# Altium footprint library PBL - SMD Packages.PcbLib: 144 footprints (part 2 of 9)
Each footprint in its own frame and in the unit in brackets; x right, y up, seen from the top. Pads: shape width x height; smd on the part's side, far side on the other; paste and mask are expansions set on the pad; w line width, h text height; cw(c..) or ccw(c..) is an arc to the next point about the centre after c.
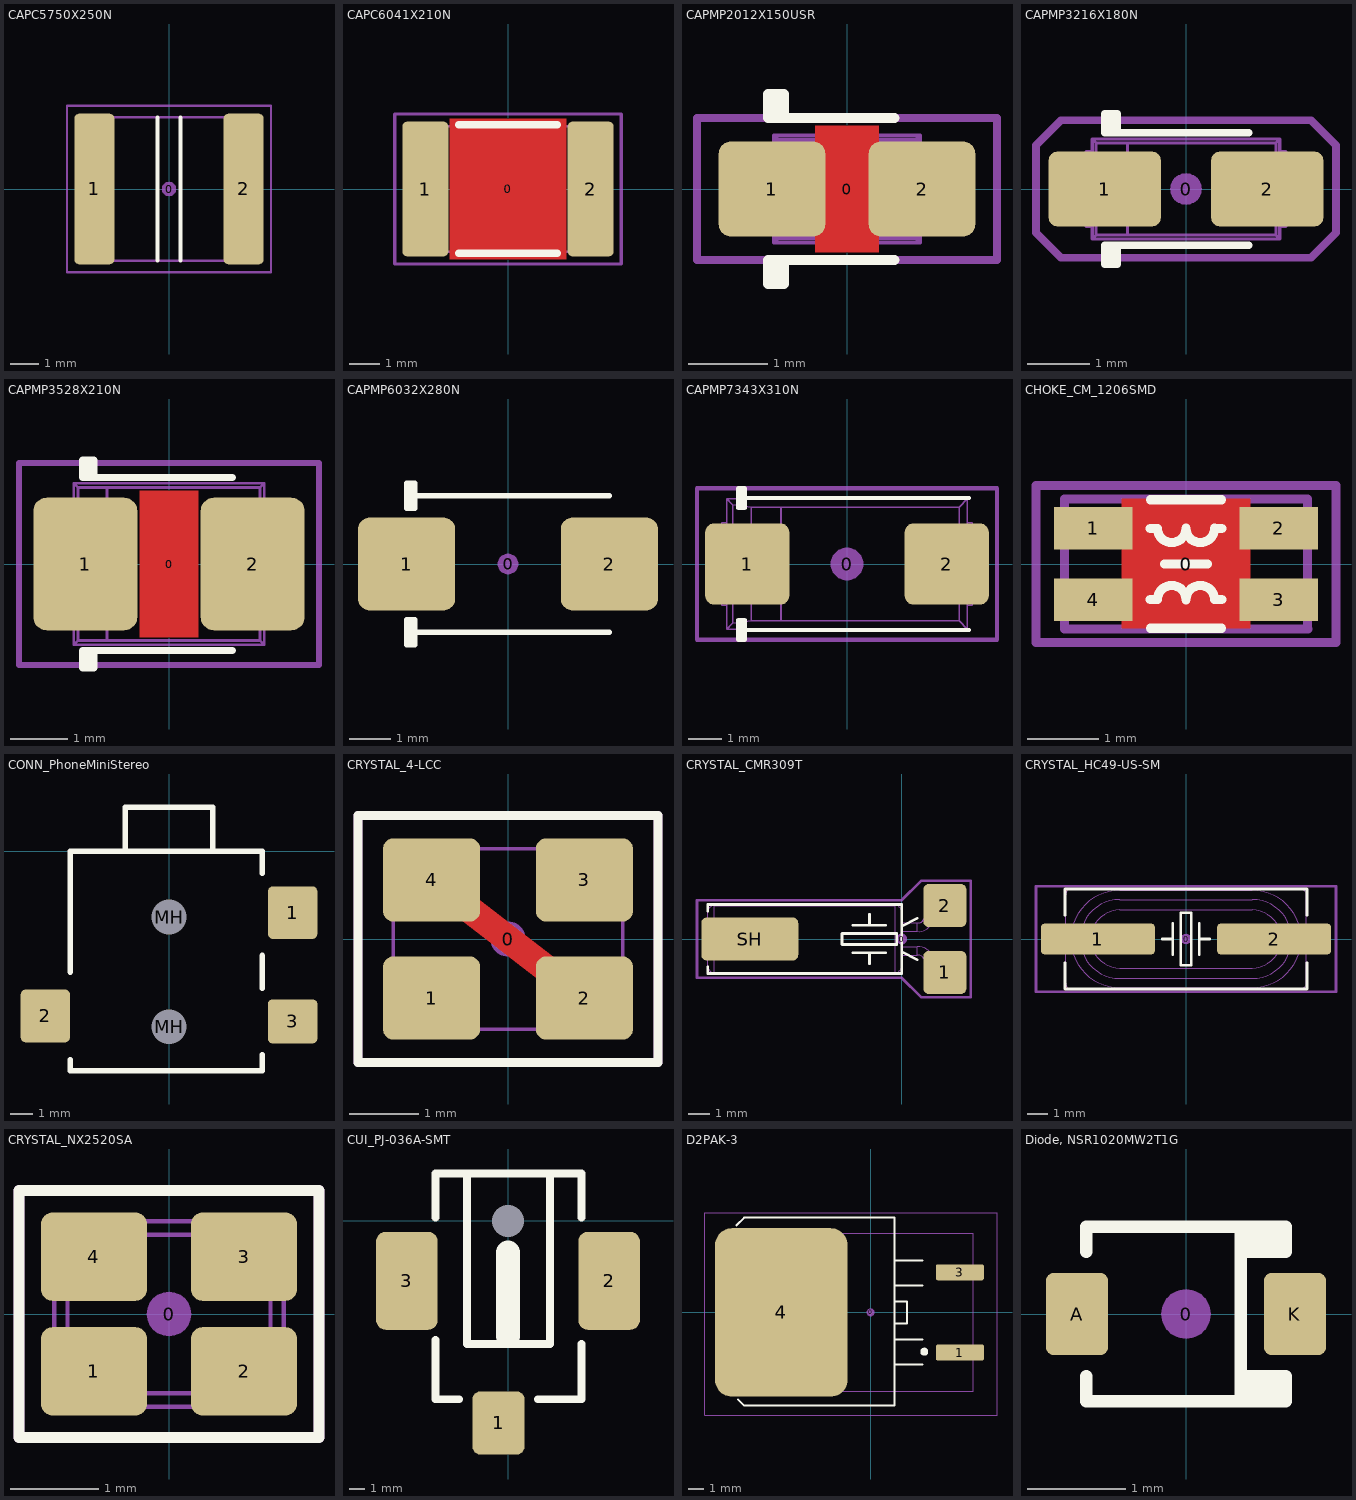
[diagram p1: the footprints below, top view; thin cyan lines are the x and y axes]

## CAPC5750X250N [mm] "Chip Capacitor, Body 5.7x5.0mm, 2220, IPC Medium Density"
height 2.5
pads (3):
  round 0.508 on Mech15: 0(0,0)
  rrect25% 1.4x5.25 smd: 1(-2.6,0) 2(2.6,0)
Top Overlay:
  lines w0.127: -0.4,-2.5 -0.4,2.5 ; 0.4,-2.5 0.4,2.5
13 - 3D Top Side:
  lines w0.076: -2.85,-2.5 2.85,-2.5 2.85,2.5 -2.85,2.5 -2.85,-2.5
15 - Top Courtyards:
  lines w0.076: -3.55,-2.9 -3.55,2.9 3.55,2.9 3.55,-2.9 -3.55,-2.9
3D body: height 2.49, standoff -0.01, extent -3.05,-2.7 3.05,2.7

## CAPC6041X210N [mm] "Stacked film capacitor, Body 6.0x4.1mm, 2416, IPC Nominal settings"
height 2.1
pads (3):
  round 0.508 on Mech15: 0(0,0)
  rrect20% 1.5x4.4 smd: 1(-2.7,0) 2(2.7,0)
Top Layer:
  pour cut-out: -1.9,2.3 1.9,2.3 1.9,-2.3 -1.9,-2.3
Top Overlay:
  lines w0.254: -1.6,-2.1 1.6,-2.1 ; -1.6,2.1 1.6,2.1
13 - 3D Top Side:
  lines w0.076: -3,-2.05 3,-2.05 3,2.05 -3,2.05 -3,-2.05
15 - Top Courtyards:
  lines w0.1: -3.7,-2.45 3.7,-2.45 3.7,2.45 -3.7,2.45 -3.7,-2.45
3D body: height 2.09, standoff -0.01, extent -3,-2.05 3,2.05
3D body: height 1.25, standoff 0, extent -1.499,-0.799 1.499,0.799

## CAPMP2012X150USR [mm] "Molded body capacitor, Body 2.0x1.2mm, 0805, IPC Medium Density"
height 1.5
pads (3):
  round 0.254 on Mech15: 0(0,0)
  rrect25% 1.35x1.2 smd: 1(-0.95,0) 2(0.95,0)
Top Layer:
  pour cut-out: -0.4,0.8 0.4,0.8 0.4,-0.8 -0.4,-0.8
Top Overlay:
  lines w0.127: -0.9,-1.2 -0.9,-0.9 ; -0.9,0.9 -0.9,1.2 ; -0.8,-0.9 -0.8,-1.2 -1,-1.2 -1,-0.9 0.6,-0.9 ; -0.8,0.9 -0.8,1.2 -1,1.2 -1,0.9 0.6,0.9
13 - 3D Top Side:
  lines w0.05: -1.025,-0.25 -0.925,-0.25 ; -1.025,0.25 -0.925,0.25 ; -0.925,-0.5 -1.025,-0.5 -1.025,0.5 -0.925,0.5 ; -0.373,-0.623 -0.373,0.623 ; 0.925,-0.5 1.025,-0.5 1.025,0.5 0.925,0.5 ; 0.925,-0.25 1.025,-0.25 ; 0.925,0.25 1.025,0.25 ; -0.925,-0.675 -0.873,-0.623 ; -0.925,-0.675 -0.925,0.675 ; -0.925,-0.675 0.925,-0.675 ; -0.925,0.675 -0.873,0.623 ; -0.925,0.675 0.925,0.675 ; -0.873,-0.623 -0.873,0.623 ; -0.873,-0.623 0.873,-0.623 ; -0.873,0.623 0.873,0.623 ; 0.873,-0.623 0.873,0.623 ; 0.873,-0.623 0.925,-0.675 ; 0.873,0.623 0.925,0.675 ; 0.925,-0.675 0.925,0.675
15 - Top Courtyards:
  lines w0.1: -1.9,-0.9 -1.9,0.9 1.9,0.9 1.9,-0.9 -1.9,-0.9
3D body: height 1.5, standoff 0, extent -1.025,-0.675 1.025,0.675

## CAPMP3216X180N [mm] "Capacitor, polarized, Molded Body, EIA 535BAAC size A; 3.20mm L X 1.60mm W X 1.80mm H"
height 1.8
pads (3):
  round 0.508 on Mech15: 0(0,0)
  rrect25% 1.8x1.2 smd: 1(-1.3,0) 2(1.3,0)
Top Overlay:
  lines w0.127: -1.2,-1.2 -1.2,-0.9 ; -1.2,0.9 -1.2,1.2 ; -1.1,-0.9 -1.1,-1.2 -1.3,-1.2 -1.3,-0.9 1,-0.9 ; -1.1,0.9 -1.1,1.2 -1.3,1.2 -1.3,0.9 1,0.9
13 - 3D Top Side:
  lines w0.05: -1.6,-0.36 -1.499,-0.36 ; -1.6,0.36 -1.499,0.36 ; -1.499,-0.6 -1.6,-0.6 -1.6,0.6 -1.499,0.6 ; -0.937,-0.737 -0.937,0.737 ; 1.499,-0.6 1.6,-0.6 1.6,0.6 1.499,0.6 ; 1.499,-0.36 1.6,-0.36 ; 1.499,0.36 1.6,0.36 ; -1.5,-0.8 -1.5,0.8 ; -1.5,-0.8 1.5,-0.8 ; -1.5,-0.8 -1.437,-0.737 ; -1.5,0.8 1.5,0.8 ; -1.5,0.8 -1.437,0.737 ; -1.437,-0.737 -1.437,0.737 ; -1.437,-0.737 1.437,-0.737 ; -1.437,0.737 1.437,0.737 ; 1.437,-0.737 1.437,0.737 ; 1.437,-0.737 1.5,-0.8 ; 1.437,0.737 1.5,0.8 ; 1.5,-0.8 1.5,0.8
15 - Top Courtyards:
  lines w0.127: -2.4,-0.7 -2,-1.1 2,-1.1 2.4,-0.7 2.4,0.7 2,1.1 -2,1.1 -2.4,0.7 -2.4,-0.7
3D body: height 1.8, standoff 0, extent -1.6,-0.8 1.6,0.8

## CAPMP3528X210N [mm] "Molded body capacitor, Body 3.5x2.8mm, 1210, IPC Nominal settings"
height 2.1
pads (3):
  round 0.254 on Mech15: 0(0,0)
  rrect25% 1.8x2.3 smd: 1(-1.45,0) 2(1.45,0)
Top Layer:
  pour cut-out: -0.508,1.27 0.508,1.27 0.508,-1.27 -0.508,-1.27
Top Overlay:
  lines w0.127: -1.4,-1.8 -1.4,-1.5 ; -1.4,1.5 -1.4,1.8 ; -1.3,-1.5 -1.3,-1.8 -1.5,-1.8 -1.5,-1.5 1.1,-1.5 ; -1.3,1.5 -1.3,1.8 -1.5,1.8 -1.5,1.5 1.1,1.5
13 - 3D Top Side:
  lines w0.05: -1.75,-0.55 -1.65,-0.55 ; -1.75,0.55 -1.65,0.55 ; -1.65,-1.1 -1.75,-1.1 -1.75,1.1 -1.65,1.1 ; -1.077,-1.327 -1.077,1.327 ; 1.65,-1.1 1.75,-1.1 1.75,1.1 1.65,1.1 ; 1.65,-0.55 1.75,-0.55 ; 1.65,0.55 1.75,0.55 ; -1.65,-1.4 1.65,-1.4 ; -1.65,-1.4 -1.65,1.4 ; -1.65,-1.4 -1.577,-1.327 ; -1.65,1.4 1.65,1.4 ; -1.65,1.4 -1.577,1.327 ; -1.577,-1.327 1.577,-1.327 ; -1.577,-1.327 -1.577,1.327 ; -1.577,1.327 1.577,1.327 ; 1.577,-1.327 1.65,-1.4 ; 1.577,-1.327 1.577,1.327 ; 1.577,1.327 1.65,1.4 ; 1.65,-1.4 1.65,1.4
15 - Top Courtyards:
  lines w0.1: -2.6,-1.75 2.6,-1.75 2.6,1.75 -2.6,1.75 -2.6,-1.75
3D body: height 2.1, standoff 0, extent -1.75,-1.4 1.75,1.4

## CAPMP6032X280N [mm] "Capacitor, polarized, Molded Body, EIA 535BAAC size C; 6.00mm L X 3.20mm W X 2.80mm H"
height 2.8
pads (3):
  round 0.508 on Mech15: 0(0,0)
  rrect25% 2.35x2.25 smd: 1(-2.45,0) 2(2.45,0)
Top Overlay:
  lines w0.127: -2.45,-1.65 2.45,-1.65 ; -2.45,1.65 2.45,1.65 ; -2.35,-1.95 -2.35,-1.65 -2.35,-1.35 ; -2.35,1.35 -2.35,1.65 -2.35,1.95 ; -2.45,-1.95 -2.25,-1.95 -2.25,-1.65 -2.25,-1.35 -2.45,-1.35 -2.45,-1.95 ; -2.45,1.35 -2.25,1.35 -2.25,1.65 -2.25,1.95 -2.45,1.95 -2.45,1.35
3D body: height 2.8, standoff 0, extent -3,-1.6 3,1.6

## CAPMP7343X310N [mm] "Molded body capacitor, Body 7.3x4.3mm, 2917, IPC Nominal settings"
height 3.1
pads (3):
  round 1 on Mech15: 0(0,0)
  rrect20% 2.55x2.45 smd: 1(-3.025,0) 2(3.025,0)
Top Overlay:
  lines w0.127: -3.3,-2 3.7,-2 ; -3.3,2 3.7,2 ; -3.2,-2.3 -3.2,-2 -3.2,-1.7 ; -3.2,1.7 -3.2,2 -3.2,2.3 ; -3.3,-2.3 -3.3,-1.7 -3.1,-1.7 -3.1,-2 -3.1,-2.3 -3.3,-2.3 ; -3.3,1.7 -3.3,2.3 -3.1,2.3 -3.1,2 -3.1,1.7 -3.3,1.7
13 - 3D Top Side:
  lines w0.05: -3.8,-0.5 -3.65,-0.5 ; -3.8,0.5 -3.65,0.5 ; -3.67,-0.5 -3.67,0.5 ; -3.65,-1.25 -3.8,-1.25 -3.8,1.25 -3.65,1.25 ; -2.901,-0.575 -2.901,0.575 ; 3.65,-1.25 3.8,-1.25 3.8,1.25 3.65,1.25 ; 3.65,-0.5 3.8,-0.5 ; 3.65,0.5 3.8,0.5 ; 3.67,-0.5 3.67,0.5 ; -3.65,-1.975 -3.65,1.975 ; -3.65,-1.975 -3.471,-1.796 ; -3.65,-1.975 3.65,-1.975 ; -3.65,1.975 3.65,1.975 ; -3.65,1.975 -3.471,1.796 ; -3.471,-1.796 -3.471,1.796 ; -3.471,-1.796 -2.907,-1.727 ; -3.471,1.796 -2.907,1.727 ; -2.907,-1.727 -2.907,-0.575 -2.001,-0.575 -2.001,-1.727 ; -2.907,-1.727 -2.001,-1.727 ; -2.907,1.727 -2.907,0.575 -2.001,0.575 -2.001,1.727 ; -2.907,1.727 -2.001,1.727 ; -2.001,-1.727 3.401,-1.726 ; -2.001,1.727 3.401,1.726 ; 3.401,-1.726 3.401,1.726 ; 3.401,-1.726 3.65,-1.975 ; 3.401,1.726 3.65,1.975 ; 3.65,-1.975 3.65,1.975
15 - Top Courtyards:
  lines w0.127: -4.55,-2.3 -4.55,2.3 4.55,2.3 4.55,-2.3 -4.55,-2.3
3D body: height 3.1, standoff 0, extent -3.8,-1.975 3.8,1.975

## CHOKE_CM_1206SMD [mm] "Common-mode choke, Body 3.4x1.8x2.2mm"
height 2.2
pads (5):
  round 0.5 on Mech15: 0(0,0)
  rrect1% 1.1x0.6 smd: 1(-1.3,0.5) 2(1.3,0.5) 3(1.3,-0.5) 4(-1.3,-0.5)
Top Layer:
  pour cut-out: -0.9,0.91 0.9,0.91 0.9,-0.9 -0.9,-0.9
Top Overlay:
  lines w0.127: -0.5,-0.9 0.5,-0.9 ; -0.5,-0.5 -0.4,-0.5 cw(c-0.2,-0.5) 0,-0.5 cw(c0.2,-0.5) 0.4,-0.5 0.5,-0.5 ; -0.5,0.5 -0.4,0.5 ccw(c-0.2,0.5) 0,0.5 ccw(c0.2,0.5) 0.4,0.5 0.5,0.5 ; -0.5,0.9 0.5,0.9 ; -0.3,0 0.3,0
13 - 3D Top Side:
  lines w0.127: 1.7,-0.91 1.7,0.91 -1.7,0.91 -1.7,-0.91 1.71,-0.91
15 - Top Courtyards:
  lines w0.127: -2.1,-1.1 -2.1,1.1 2.1,1.1 2.1,-1.1 -2.1,-1.1
3D body: height 2.2, standoff 0, extent -1.71,-0.91 1.71,0.91

## CONN_PhoneMiniStereo [mm] "CUI SJ1-2513-SMT 2.5mm stereo jack"
height 4
pads (5):
  rrect20% 2.25x2.4 smd: 1(5.625,-2.8) 2(-5.625,-7.5)
  rrect20% 2.25x2 smd: 3(5.625,-7.75)
  round 1.524 hole 1.575 unplated: MH(0,-8) MH(0,-3)
Top Overlay:
  lines w0.254: -4.5,-9.5 -4.5,-10 4.25,-10 4.25,-9.275 ; -4.5,-5.5 -4.5,0 4.25,0 4.25,-1 ; -2,0 -2,2 2,2 2,0 ; 4.25,-6.25 4.25,-4.75
3D body: height 4.12, standoff -0.43, extent -6,-10 6,2

## CRYSTAL_4-LCC [mm] "SMD Crystal 4-lead leadless package"
height 0.8
pads (5):
  round 0.508 on Mech15: 0(0,0)
  rrect25% 1.4x1.2 smd: 1(-1.1,-0.85) 2(1.1,-0.85) 3(1.1,0.85) 4(-1.1,0.85)
Top Layer:
  lines w0.4: -1.1,0.85 1.1,-0.85
Top Overlay:
  lines w0.127: -2.159,-1.778 -2.159,1.778 2.159,1.778 2.159,-1.778 -2.159,-1.778
13 - 3D Top Side:
  lines w0.05: -1.65,-1.143 -1.493,-1.3 1.493,-1.3 1.65,-1.143 1.65,1.144 1.494,1.3 -1.493,1.3 -1.65,1.143 -1.65,-1.143
15 - Top Courtyards:
  lines w0.127: -2.159,-1.778 2.159,-1.778 2.159,1.778 -2.159,1.778 -2.159,-1.778
3D body: height 0.8, standoff 0, extent -1.65,-1.3 1.65,1.3

## CRYSTAL_CMR309T [mm] "SMD Crystal CMR309T package"
height 3.1
pads (4):
  round 0.508 on Mech15: 0(0,0)
  rrect25% 2x2 smd: 1(2,-1.55) 2(2,1.55)
  rrect25% 4.5x2 smd: SH(-7.05,0)
Top Overlay:
  lines w0.127: -9,-1.3 -9,-1.6 0,-1.6 0,-0.6 ; -9,1.3 -9,1.6 0,1.6 0,0.6 ; -2.262,-0.635 -0.738,-0.635 ; -2.262,0.635 -0.738,0.635 ; -1.5,-1.143 -1.5,-0.635 ; -1.5,0.635 -1.5,1.143 ; 0.72,-0.96 0,-0.6 ; 0.72,0.96 0,0.6 ; 0,-0.6 0,0.6 ; -2.77,-0.254 -2.77,0.254 -0.23,0.254 -0.23,-0.254 -2.77,-0.254
13 - 3D Top Side:
  lines w0.05: 0,-0.75 0.71,-0.75 ; 0,-0.35 0.71,-0.35 ; 0,0.35 0.71,0.35 ; 0,0.75 0.71,0.75 ; 0.931,-0.79 0.937,-0.798 0.965,-0.823 0.999,-0.84 1.037,-0.85 1.077,-0.851 1.118,-0.843 1.158,-0.828 1.195,-0.805 1.226,-0.776 1.252,-0.741 1.27,-0.704 1.279,-0.664 1.28,-0.625 1.271,-0.588 1.255,-0.555 1.25,-0.548 ; 0.931,0.79 0.937,0.798 0.965,0.823 0.999,0.84 1.037,0.85 1.077,0.851 1.118,0.843 1.158,0.828 1.195,0.805 1.226,0.776 1.252,0.741 1.27,0.704 1.279,0.664 1.28,0.625 1.271,0.588 1.255,0.555 1.25,0.548 ; -8.7,-1.55 cw(c-8.7,-1.25) -9,-1.25 -9,1.25 cw(c-8.7,1.25) -8.7,1.55 ; -8.7,-1.55 -0.3,-1.55 ; -8.7,-1.55 -8.7,1.55 ; -8.7,1.55 -0.3,1.55 ; -0.3,-1.55 ccw(c-0.3,-1.25) 0,-1.25 0,1.25 ccw(c-0.3,1.25) -0.3,1.55 ; -0.3,-1.55 -0.3,1.55 ; 0.71,-0.75 cw(c0.741,-1.171) 0.936,-0.796 1.229,-1.183 ; 0.71,-0.75 0.71,-0.35 ; 0.71,-0.35 cw(c0.757,-1.055) 1.25,-0.548 ; 0.71,0.35 ccw(c0.775,1.007) 1.25,0.548 ; 0.71,0.35 0.71,0.75 ; 0.71,0.75 0.73,0.75 0.773,0.753 0.814,0.758 0.851,0.765 0.881,0.773 0.906,0.781 0.923,0.789 0.933,0.794 0.937,0.797 ; 0.937,0.797 0.937,0.797 ; 0.937,0.797 1.229,1.183 ; 1.229,-1.183 ccw(c2.616,-0.029) 1.491,-1.439 ; 1.229,-1.183 1.236,-1.191 1.263,-1.216 1.297,-1.234 1.335,-1.243 1.376,-1.244 1.417,-1.237 1.456,-1.221 1.493,-1.198 1.525,-1.169 1.55,-1.135 1.568,-1.097 1.577,-1.058 1.578,-1.019 1.569,-0.982 1.553,-0.948 1.548,-0.942 ; 1.229,1.183 cw(c2.589,0.057) 1.491,1.439 ; 1.229,1.183 1.236,1.191 1.263,1.216 1.297,1.234 1.335,1.243 1.376,1.244 1.417,1.237 1.456,1.221 1.493,1.198 1.525,1.169 1.55,1.135 1.568,1.097 1.577,1.058 1.578,1.019 1.569,0.982 1.553,0.948 1.548,0.942 ; 1.25,-0.548 1.548,-0.942 ; 1.25,0.548 1.548,0.942 ; 1.491,-1.439 ccw(c0.753,-0.568) 1.746,-1.132 ; 1.491,-1.439 2.472,-2.254 ccw(c1.735,-1.382) 2.728,-1.946 1.746,-1.132 ; 1.491,1.439 cw(c0.753,0.568) 1.746,1.132 ; 1.491,1.439 2.472,2.254 cw(c1.735,1.382) 2.728,1.946 1.746,1.132 ; 1.548,-0.942 ccw(c2.638,-0.003) 1.746,-1.132 ; 1.548,0.942 cw(c2.604,0.039) 1.746,1.132
15 - Top Courtyards:
  lines w0.127: -9.5,-1.8 -9.5,1.8 0,1.8 0.9,2.7 3.2,2.7 3.2,-2.7 0.9,-2.7 0,-1.8 -9.5,-1.8
3D body: height 3.07, standoff -0.01, extent -9,-2.254 2.728,2.254

## CRYSTAL_HC49-US-SM [mm] "SMD Crystal HC49/US-SM package"
height 4.3
pads (3):
  round 0.508 on Mech15: 0(0,0)
  rrect25% 5.5x1.5 smd: 1(-4.25,0) 2(4.25,0)
Top Overlay:
  lines w0.127: -5.842,-1.143 -5.842,-2.413 5.842,-2.413 5.842,-1.143 ; -5.842,1.143 -5.842,2.413 5.842,2.413 5.842,1.143 ; -1.143,0 -0.635,0 ; -0.635,-0.762 -0.635,0.762 ; 0.635,-0.762 0.635,0.762 ; 0.635,0 1.143,0 ; -0.254,-1.27 0.254,-1.27 0.254,1.27 -0.254,1.27 -0.254,-1.27
13 - 3D Top Side:
  lines w0.05: -5.8,-0.45 -6.4,-0.45 -6.4,0.45 -5.8,0.45 ; 5.8,-0.45 6.4,-0.45 6.4,0.45 5.8,0.45 ; -5.8,-2.165 ccw(c-5.55,-2.165) -5.55,-2.415 5.55,-2.415 ccw(c5.55,-2.165) 5.8,-2.165 5.8,2.165 ccw(c5.55,2.165) 5.55,2.415 -5.55,2.415 ccw(c-5.55,2.165) -5.8,2.165 -5.8,-2.165 ; -3.2,-2.35 cw(c-3.2,0) -3.2,2.35 3.2,2.35 cw(c3.2,0) 3.2,-2.35 -3.2,-2.35 ; -3.2,-1.9 cw(c-3.2,0) -3.2,1.9 3.2,1.9 cw(c3.2,0) 3.2,-1.9 -3.2,-1.9 ; -3.2,-1.4 cw(c-3.2,0) -3.2,1.4 3.2,1.4 cw(c3.2,0) 3.2,-1.4 -3.2,-1.4
15 - Top Courtyards:
  lines w0.127: -7.239,-2.54 7.239,-2.54 7.239,2.54 -7.239,2.54 -7.239,-2.54
3D body: height 4.29, standoff -0.01, extent -6.4,-2.415 6.4,2.415

## CRYSTAL_NX2520SA [mm] "SMD Crystal 4-lead leadless package"
height 0.55
pads (5):
  round 0.508 on Mech15: 0(0,0)
  rrect25% 1.2x1 smd mask+0.075: 1(-0.85,-0.65) 2(0.85,-0.65) 3(0.85,0.65) 4(-0.85,0.65)
Top Overlay:
  lines w0.127: -1.7,-1.4 -1.7,1.4 1.7,1.4 1.7,-1.4 -1.7,-1.4
13 - 3D Top Side:
  lines w0.05: -1.3,-0.87 cw(c-1.3,-1.05) -1.12,-1.05 1.12,-1.05 cw(c1.3,-1.05) 1.3,-0.87 1.3,0.87 cw(c1.3,1.05) 1.12,1.05 -1.12,1.05 cw(c-1.3,1.05) -1.3,0.87 -1.3,-0.87 ; -1.15,-0.75 ccw(c-1,-0.75) -1,-0.9 1,-0.9 ccw(c1,-0.75) 1.15,-0.75 1.15,0.75 ccw(c1,0.75) 1,0.9 -1,0.9 ccw(c-1,0.75) -1.15,0.75 -1.15,-0.75
15 - Top Courtyards:
  lines w0.127: -1.7,-1.4 1.7,-1.4 1.7,1.4 -1.7,1.4 -1.7,-1.4
3D body: height 0.55, standoff 0, extent -1.3,-1.05 1.3,1.05

## CUI_PJ-036A-SMT [mm]
pads (4):
  rrect30% 3.3x4 smd: 1(-0.6,-12.8)
  rrect30% 3.9x6.2 smd: 2(6.4,-3.8) 3(-6.4,-3.8)
  rrect30% 0x0 hole 2.032 unplated: 4(0,0)
Top Overlay:
  lines w0.5: -4.6,-7.55 -4.6,-11.3 -3.1,-11.3 ; -4.6,0.2 -4.6,3 4.65,3 4.65,0.2 ; -2.6,3 -2.6,-7.8 2.65,-7.8 2.65,2.9 ; 1.9,-11.3 4.65,-11.3 4.65,-7.8
  lines w1.5: 0,-7.3 0,-2
3D body: height 11.09, standoff -1.51, extent -7.5,-14.1 7.7,3

## D2PAK-3 [mil] "D-PAK/TO-263-3; 3 Leads (1 Cropped); Body 14.7 (inc. leads) x 10.2 mm (LxW max)"
height 180
pads (4):
  round 20 on Mech15: 0(0,0)
  rrect25% 120x40 smd: 1(222.5,-100) 3(222.5,100)
  rrect25% 330x420 smd: 4(-222.5,0)
Top Overlay:
  circle w9.84: c133.8,-97.83 r4.92
  lines w5: -334.65,216.54 -314.96,236.22 59.06,236.22 59.06,-232.28 -314.96,-232.28 -330.71,-216.54 ; 129.92,-129.92 59.06,-129.92 59.06,-66.93 129.92,-66.93 ; 129.92,66.93 59.06,66.93 59.06,129.92 129.92,129.92 ; 59.06,-27.56 59.06,27.56 90.55,27.56 90.55,-27.56 59.06,-27.56
13 - 3D Top Side:
  lines w3: -361.41,-196.85 255.51,-196.85 255.51,196.85 -361.41,196.85 -361.41,-196.85
15 - Top Courtyards:
  lines w3: -413.39,-255.91 -413.39,248.03 314.96,248.03 314.96,-255.91 -413.39,-255.91
3D body: height 189.36, standoff 0.39, extent -361.41,-196.85 255.51,196.85

## Diode, NSR1020MW2T1G [mil]
pads (3):
  round 20 on Mech15: 0(0,0)
  rrect25% 25x33 smd: A(-43.75,0) K(43.75,0)
Top Overlay:
  lines w5: -40,-25 -40,-35 40,-35 40,-25 22,-25 ; -40,25 -40,35 40,35 40,25 22,25 ; 22,-35 22,35 ; 25,-35 25,-25 ; 25,25 25,35 ; 28,-35 28,-25 ; 28,25 28,35 ; 31,-35 31,-25 ; 31,25 31,35 ; 34,-35 34,-25 ; 34,25 34,35 ; 37,-35 37,-25 ; 37,25 37,35